# Altium footprint library LimeMicroAltiumLib.PcbLib: 876 footprints (part 28 of 57)
Each footprint in its own frame and in the unit in brackets; x right, y up, seen from the top. Pads: shape width x height; smd on the part's side, far side on the other; paste and mask are expansions set on the pad; w line width, h text height; cw(c..) or ccw(c..) is an arc to the next point about the centre after c.
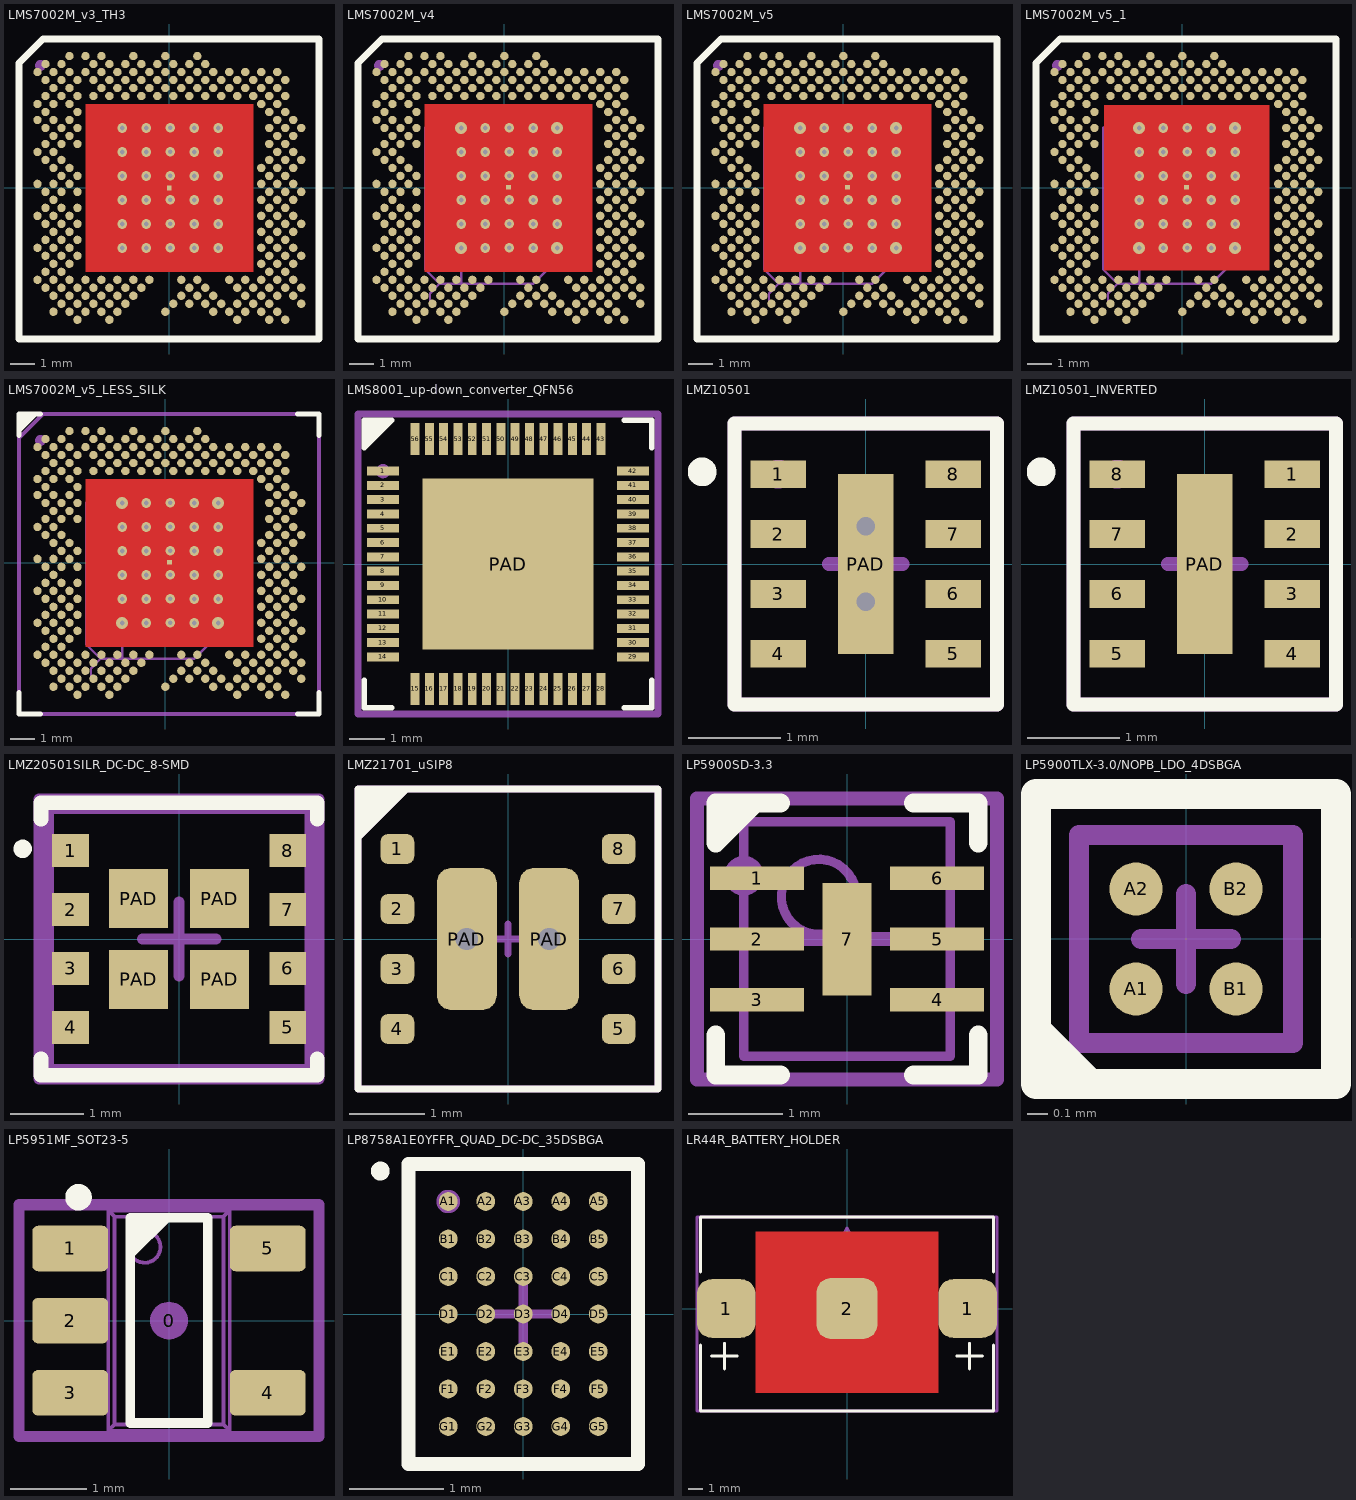
[diagram p27: the footprints below, top view; thin cyan lines are the x and y axes]

## LMS7002M_v3_TH3 [mm] "LMS7002 without AM2 pad (internally unconnected). Thermal pad version 3"
pads (261):
  round 0.35 smd mask+0: A5(-4.163,5.495) A7(-3.497,5.495) A9(-2.831,5.495) A13(-1.499,5.495) A17(-0.166,5.495) A21(1.166,5.495) AA1(-5.495,-1.166) AA3(-4.829,-1.166) AA5(-4.163,-1.166) AA29(3.83,-1.166) AA31(4.496,-1.165) AA33(5.162,-1.165) AB2(-5.162,-1.499) AB4(-4.496,-1.499) AB6(-3.83,-1.499) AB30(4.163,-1.499) AB32(4.829,-1.499) AB34(5.495,-1.499) AC3(-4.829,-1.832) AC5(-4.163,-1.832) AC29(3.83,-1.832) AC31(4.496,-1.832) AC33(5.162,-1.832) AD2(-5.162,-2.165) AD4(-4.496,-2.165) AD6(-3.83,-2.165) AD30(4.163,-2.165) AD32(4.829,-2.165) AE1(-5.495,-2.498) AE3(-4.829,-2.498) AE5(-4.163,-2.498) AE29(3.83,-2.498) AE31(4.496,-2.498) AE33(5.162,-2.498) AF2(-5.162,-2.831) AF4(-4.496,-2.831) AF6(-3.83,-2.831) AF30(4.163,-2.831) AF32(4.829,-2.831) AF34(5.495,-2.831) AG3(-4.829,-3.164) AG5(-4.163,-3.164) AG29(3.83,-3.164) AG31(4.496,-3.164) AG33(5.162,-3.164) AH2(-5.162,-3.497) AH4(-4.496,-3.497) AH30(4.163,-3.497) AH32(4.829,-3.497) AJ1(-5.495,-3.83) AJ3(-4.829,-3.83) AJ5(-4.163,-3.83) AJ7(-3.497,-3.83) AJ9(-2.831,-3.83) AJ11(-2.165,-3.83) AJ13(-1.499,-3.83) AJ15(-0.833,-3.83) AJ19(0.499,-3.83) AJ21(1.166,-3.83) AJ25(2.498,-3.83) AJ27(3.164,-3.83) AJ29(3.83,-3.83) AJ31(4.496,-3.83) AJ33(5.162,-3.83) AK2(-5.162,-4.163) AK4(-4.496,-4.163) AK6(-3.83,-4.163) AK8(-3.164,-4.163) AK10(-2.498,-4.163) AK12(-1.832,-4.163) AK14(-1.166,-4.163) AK20(0.833,-4.163) AK22(1.499,-4.163) AK26(2.831,-4.163) AK28(3.497,-4.163) AK30(4.163,-4.163) AK32(4.829,-4.163) AK34(5.495,-4.163) AL3(-4.829,-4.496) AL5(-4.163,-4.496) AL7(-3.497,-4.496) AL9(-2.831,-4.496) AL11(-2.165,-4.496) AL13(-1.499,-4.496) AL19(0.499,-4.496) AL21(1.166,-4.496) AL23(1.832,-4.496) AL27(3.164,-4.496) AL29(3.83,-4.496) AL31(4.496,-4.496) AL33(5.162,-4.496) AM4(-4.496,-4.829) AM6(-3.83,-4.829) AM8(-3.164,-4.829) AM10(-2.498,-4.829) AM12(-1.832,-4.829) AM18(0.166,-4.829) AM20(0.833,-4.829) AM22(1.499,-4.829) AM24(2.165,-4.829) AM26(2.831,-4.829) AM28(3.497,-4.829) AM30(4.163,-4.829) AM34(5.495,-4.829) AN3(-4.829,-5.162) AN5(-4.163,-5.162) AN7(-3.497,-5.162) AN9(-2.831,-5.162) AN11(-2.165,-5.162) AN17(-0.167,-5.162) AN23(1.832,-5.162) AN25(2.498,-5.162) AN27(3.164,-5.162) AN29(3.83,-5.162) AN31(4.496,-5.162) AP6(-3.83,-5.495) AP10(-2.498,-5.495) AP26(2.831,-5.495) AP30(4.163,-5.495) AP32(4.829,-5.495) B2(-5.162,5.162) B4(-4.496,5.162) B8(-3.164,5.162) B10(-2.498,5.162) B12(-1.832,5.162) B14(-1.166,5.162) B16(-0.5,5.162) B18(0.167,5.162) B20(0.833,5.162) B22(1.499,5.162) C1(-5.495,4.829) C3(-4.829,4.829) C5(-4.163,4.829) C7(-3.497,4.829) C9(-2.831,4.829) C11(-2.165,4.829) C13(-1.499,4.829) C15(-0.833,4.829) C17(-0.166,4.829) C19(0.5,4.829) C21(1.166,4.829) C23(1.832,4.829) C25(2.498,4.829) C27(3.164,4.829) C29(3.83,4.829) C31(4.496,4.829) D2(-5.162,4.496) D4(-4.496,4.496) D6(-3.83,4.496) D8(-3.164,4.496) D10(-2.498,4.496) D12(-1.832,4.496) D14(-1.166,4.496) D16(-0.5,4.496) D18(0.167,4.496) D20(0.833,4.496) D22(1.499,4.496) D24(2.165,4.496) D26(2.831,4.496) D28(3.497,4.496) D30(4.163,4.496) D32(4.829,4.496) E3(-4.829,4.163) E5(-4.163,4.163) E9(-2.831,4.163) E11(-2.165,4.163) E13(-1.499,4.163) E15(-0.833,4.163) E17(-0.166,4.163) E19(0.5,4.163) E21(1.166,4.163) E23(1.832,4.163) E25(2.498,4.163) E27(3.164,4.163) E29(3.83,4.163) E31(4.496,4.163) F2(-5.162,3.83) F4(-4.496,3.83) F6(-3.83,3.83) F8(-3.164,3.83) F10(-2.498,3.83) F12(-1.832,3.83) F14(-1.166,3.83) F16(-0.5,3.83) F18(0.167,3.83) F20(0.833,3.83) F22(1.499,3.83) F24(2.165,3.83) F26(2.831,3.83) F28(3.497,3.83) F30(4.163,3.83) F32(4.829,3.83) G1(-5.495,3.497) G3(-4.829,3.497) G5(-4.163,3.497) G29(3.83,3.497) G31(4.496,3.497) H2(-5.162,3.164) H6(-3.83,3.164) H30(4.163,3.164) H32(4.829,3.164) J1(-5.495,2.831) J3(-4.829,2.831) J5(-4.163,2.831) J31(4.496,2.831) J33(5.162,2.831) K2(-5.162,2.498) K4(-4.496,2.498) K6(-3.83,2.498) K30(4.163,2.498) K32(4.829,2.498) K34(5.495,2.498) L3(-4.829,2.165) L5(-4.163,2.165) L31(4.496,2.165) L33(5.162,2.165) M2(-5.162,1.832) M4(-4.496,1.832) M6(-3.83,1.832) M30(4.163,1.832) M32(4.829,1.832) N1(-5.495,1.498) N3(-4.829,1.498) N31(4.496,1.499) N33(5.162,1.499) P2(-5.162,1.165) P4(-4.496,1.165) P30(4.163,1.166) P32(4.829,1.166) P34(5.495,1.166) R3(-4.829,0.832) R5(-4.163,0.832) R29(3.83,0.833) R31(4.496,0.833) R33(5.162,0.833) T4(-4.496,0.499) T6(-3.83,0.499) T30(4.163,0.5) T32(4.829,0.5) U1(-5.495,0.166) U3(-4.829,0.166) U5(-4.163,0.166) U29(3.83,0.167) U31(4.496,0.167) U33(5.162,0.167) V2(-5.162,-0.167) V4(-4.496,-0.167) V6(-3.83,-0.167) V30(4.163,-0.166) V32(4.829,-0.166) V34(5.495,-0.166) W3(-4.829,-0.5) W29(3.83,-0.499) W31(4.496,-0.499) W33(5.162,-0.499) Y2(-5.162,-0.833) Y4(-4.496,-0.833) Y6(-3.83,-0.833) Y30(4.163,-0.833) Y32(4.829,-0.832)
  rect 0.2x0.2 smd: GND(0,0)
via 0.035,-1.496 diameter 0.4 hole 0.2
via 0.035,-2.496 diameter 0.4 hole 0.2
via 0.035,0.504 diameter 0.4 hole 0.2
via 0.035,-0.496 diameter 0.4 hole 0.2
via 0.035,1.504 diameter 0.4 hole 0.2
via 0.035,2.504 diameter 0.4 hole 0.2
via -0.965,2.494 diameter 0.4 hole 0.2
via -0.965,1.494 diameter 0.4 hole 0.2
via -0.965,-0.506 diameter 0.4 hole 0.2
via -0.965,0.494 diameter 0.4 hole 0.2
via -0.965,-2.506 diameter 0.4 hole 0.2
via -0.965,-1.506 diameter 0.4 hole 0.2
via -1.965,2.494 diameter 0.4 hole 0.2
via -1.965,1.494 diameter 0.4 hole 0.2
via -1.965,-0.506 diameter 0.4 hole 0.2
via -1.965,0.494 diameter 0.4 hole 0.2
via -1.965,-2.506 diameter 0.4 hole 0.2
via -1.965,-1.506 diameter 0.4 hole 0.2
via 2.035,-1.506 diameter 0.4 hole 0.2
via 2.035,-2.506 diameter 0.4 hole 0.2
via 2.035,0.494 diameter 0.4 hole 0.2
via 2.035,-0.506 diameter 0.4 hole 0.2
via 2.035,1.494 diameter 0.4 hole 0.2
via 2.035,2.494 diameter 0.4 hole 0.2
via 1.035,-1.506 diameter 0.4 hole 0.2
via 1.035,-2.506 diameter 0.4 hole 0.2
via 1.035,0.494 diameter 0.4 hole 0.2
via 1.035,-0.506 diameter 0.4 hole 0.2
via 1.035,1.494 diameter 0.4 hole 0.2
via 1.035,2.494 diameter 0.4 hole 0.2
Top Layer:
  rectangle: -3.49,-3.496 3.51,3.504
Top Overlay:
  lines w0.3: -6.265,-6.296 -6.265,5.204 -5.265,6.204 6.235,6.204 6.235,-6.296 -6.265,-6.296
Top Paste:
  region: -1.192,-2.783 0.045,-1.545 -1.545,0.045 -2.783,-1.192 -2.853,-1.262 -2.929,-1.446 -2.929,-1.645 -2.853,-1.829 -2.783,-1.899 -1.899,-2.783 -1.829,-2.853 -1.645,-2.929 -1.446,-2.929 -1.262,-2.853
  region: 0.045,1.636 -1.545,0.045 0.045,-1.545 1.636,0.045
  region: 1.283,2.874 0.045,1.636 1.636,0.045 2.874,1.283 2.944,1.353 3.02,1.537 3.02,1.736 2.944,1.92 2.874,1.99 1.99,2.874 1.92,2.944 1.736,3.02 1.537,3.02 1.353,2.944
  region: -2.783,1.283 -2,0.5 -1.92,0.403 -1.824,0.171 -1.824,-0.08 -1.92,-0.312 -2,-0.409 -2.783,-1.192 -1.192,-2.783 2.874,1.283 1.283,2.874 0.399,1.99 0.323,1.928 0.143,1.853 -0.052,1.853 -0.232,1.928 -0.308,1.99 -1.192,2.874 -1.262,2.944 -1.446,3.02 -1.645,3.02 -1.829,2.944 -1.899,2.874 -2.783,1.99 -2.853,1.92 -2.929,1.736 -2.929,1.537 -2.853,1.353
  region: 2.874,-1.192 2.091,-0.409 2.011,-0.312 1.915,-0.08 1.915,0.171 2.011,0.403 2.091,0.5 2.874,1.283 1.283,2.874 -2.783,-1.192 -1.192,-2.783 -0.308,-1.899 -0.232,-1.837 -0.052,-1.762 0.143,-1.762 0.323,-1.837 0.399,-1.899 1.283,-2.783 1.353,-2.853 1.537,-2.929 1.736,-2.929 1.92,-2.853 1.99,-2.783 2.874,-1.899 2.944,-1.829 3.02,-1.645 3.02,-1.446 2.944,-1.262
Top Solder:
  rectangle: -3.49,-3.496 3.51,3.504
Mechanical 15:
  circle w0.35: c-5.365,5.104 r0.05
  lines w0.15: -6.265,-6.296 -6.265,5.204 -5.265,6.204 6.235,6.204 6.235,-6.296 -6.265,-6.296
  text ".Designator" at -0.165,0.004 h0.55
3D body "LMS7002M_11p5x11p5.STEP": height 0.97, standoff 0.03, extent -5.764,-5.746 5.736,5.754

## LMS7002M_v4 [mm] "LMS7002 without AM2 pad (internally unconnected)"
pads (261):
  round 0.35 smd mask+0: A5(-3.998,5.49) A7(-3.332,5.49) A9(-2.666,5.49) A13(-1.334,5.49) A17(-0.002,5.49) A21(1.33,5.49) AA1(-5.33,-1.17) AA3(-4.664,-1.17) AA5(-3.998,-1.17) AA29(3.994,-1.17) AA31(4.66,-1.17) AA33(5.326,-1.17) AB2(-4.997,-1.503) AB4(-4.331,-1.503) AB6(-3.665,-1.503) AB30(4.327,-1.503) AB32(4.993,-1.503) AB34(5.659,-1.503) AC3(-4.664,-1.836) AC5(-3.998,-1.836) AC29(3.994,-1.836) AC31(4.66,-1.836) AC33(5.326,-1.836) AD2(-4.997,-2.169) AD4(-4.331,-2.169) AD6(-3.665,-2.169) AD30(4.327,-2.169) AD32(4.993,-2.169) AE1(-5.33,-2.502) AE3(-4.664,-2.502) AE5(-3.998,-2.502) AE29(3.994,-2.502) AE31(4.66,-2.502) AE33(5.326,-2.502) AF2(-4.997,-2.835) AF4(-4.331,-2.835) AF6(-3.665,-2.835) AF30(4.327,-2.835) AF32(4.993,-2.835) AF34(5.659,-2.835) AG3(-4.664,-3.168) AG5(-3.998,-3.168) AG29(3.994,-3.168) AG31(4.66,-3.168) AG33(5.326,-3.168) AH2(-4.997,-3.501) AH4(-4.331,-3.501) AH30(4.327,-3.501) AH32(4.993,-3.501) AJ1(-5.33,-3.834) AJ3(-4.664,-3.834) AJ5(-3.998,-3.834) AJ7(-3.332,-3.834) AJ9(-2.666,-3.834) AJ11(-2,-3.834) AJ13(-1.334,-3.834) AJ15(-0.668,-3.834) AJ19(0.664,-3.834) AJ21(1.33,-3.834) AJ25(2.662,-3.834) AJ27(3.328,-3.834) AJ29(3.994,-3.834) AJ31(4.66,-3.834) AJ33(5.326,-3.834) AK2(-4.997,-4.167) AK4(-4.331,-4.167) AK6(-3.665,-4.167) AK8(-2.999,-4.167) AK10(-2.333,-4.167) AK12(-1.667,-4.167) AK14(-1.001,-4.167) AK20(0.997,-4.167) AK22(1.663,-4.167) AK26(2.995,-4.167) AK28(3.661,-4.167) AK30(4.327,-4.167) AK32(4.993,-4.167) AK34(5.659,-4.167) AL3(-4.664,-4.5) AL5(-3.998,-4.5) AL7(-3.332,-4.5) AL9(-2.666,-4.5) AL11(-2,-4.5) AL13(-1.334,-4.5) AL19(0.664,-4.5) AL21(1.33,-4.5) AL23(1.996,-4.5) AL27(3.328,-4.5) AL29(3.994,-4.5) AL31(4.66,-4.5) AL33(5.326,-4.5) AM4(-4.331,-4.833) AM6(-3.665,-4.833) AM8(-2.999,-4.833) AM10(-2.333,-4.833) AM12(-1.667,-4.833) AM18(0.331,-4.833) AM20(0.997,-4.833) AM22(1.663,-4.833) AM24(2.329,-4.833) AM26(2.995,-4.833) AM28(3.661,-4.833) AM30(4.327,-4.833) AM34(5.659,-4.833) AN3(-4.664,-5.166) AN5(-3.998,-5.166) AN7(-3.332,-5.166) AN9(-2.666,-5.166) AN11(-2,-5.166) AN17(-0.002,-5.166) AN23(1.996,-5.166) AN25(2.662,-5.166) AN27(3.328,-5.166) AN29(3.994,-5.166) AN31(4.66,-5.166) AP6(-3.665,-5.499) AP10(-2.333,-5.499) AP26(2.995,-5.499) AP30(4.327,-5.499) AP32(4.993,-5.499) B2(-4.997,5.157) B4(-4.331,5.157) B8(-2.999,5.157) B10(-2.333,5.157) B12(-1.667,5.157) B14(-1.001,5.157) B16(-0.335,5.157) B18(0.331,5.157) B20(0.997,5.157) B22(1.663,5.157) C1(-5.33,4.824) C3(-4.664,4.824) C5(-3.998,4.824) C7(-3.332,4.824) C9(-2.666,4.824) C11(-2,4.824) C13(-1.334,4.824) C15(-0.668,4.824) C17(-0.002,4.824) C19(0.664,4.824) C21(1.33,4.824) C23(1.996,4.824) C25(2.662,4.824) C27(3.328,4.824) C29(3.994,4.824) C31(4.66,4.824) D2(-4.997,4.491) D4(-4.331,4.491) D6(-3.665,4.491) D8(-2.999,4.491) D10(-2.333,4.491) D12(-1.667,4.491) D14(-1.001,4.491) D16(-0.335,4.491) D18(0.331,4.491) D20(0.997,4.491) D22(1.663,4.491) D24(2.329,4.491) D26(2.995,4.491) D28(3.661,4.491) D30(4.327,4.491) D32(4.993,4.491) E3(-4.664,4.158) E5(-3.998,4.158) E9(-2.666,4.158) E11(-2,4.158) E13(-1.334,4.158) E15(-0.668,4.158) E17(-0.002,4.158) E19(0.664,4.158) E21(1.33,4.158) E23(1.996,4.158) E25(2.662,4.158) E27(3.328,4.158) E29(3.994,4.158) E31(4.66,4.158) F2(-4.997,3.825) F4(-4.331,3.825) F6(-3.665,3.825) F8(-2.999,3.825) F10(-2.333,3.825) F12(-1.667,3.825) F14(-1.001,3.825) F16(-0.335,3.825) F18(0.331,3.825) F20(0.997,3.825) F22(1.663,3.825) F24(2.329,3.825) F26(2.995,3.825) F28(3.661,3.825) F30(4.327,3.825) F32(4.993,3.825) G1(-5.33,3.492) G3(-4.664,3.492) G5(-3.998,3.492) G29(3.994,3.492) G31(4.66,3.492) H2(-4.997,3.159) H6(-3.665,3.159) H30(4.327,3.159) H32(4.993,3.159) J1(-5.33,2.826) J3(-4.664,2.826) J5(-3.998,2.826) J31(4.66,2.826) J33(5.326,2.826) K2(-4.997,2.493) K4(-4.331,2.493) K6(-3.665,2.493) K30(4.327,2.493) K32(4.993,2.493) K34(5.659,2.493) L3(-4.664,2.16) L5(-3.998,2.16) L31(4.66,2.16) L33(5.326,2.16) M2(-4.997,1.827) M4(-4.331,1.827) M6(-3.665,1.827) M30(4.327,1.827) M32(4.993,1.827) N1(-5.33,1.494) N3(-4.664,1.494) N31(4.66,1.494) N33(5.326,1.494) P2(-4.997,1.161) P4(-4.331,1.161) P30(4.327,1.161) P32(4.993,1.161) P34(5.659,1.161) R3(-4.664,0.828) R5(-3.998,0.828) R29(3.994,0.828) R31(4.66,0.828) R33(5.326,0.828) T4(-4.331,0.495) T6(-3.665,0.495) T30(4.327,0.495) T32(4.993,0.495) U1(-5.33,0.162) U3(-4.664,0.162) U5(-3.998,0.162) U29(3.994,0.162) U31(4.66,0.162) U33(5.326,0.162) V2(-4.997,-0.171) V4(-4.331,-0.171) V6(-3.665,-0.171) V30(4.327,-0.171) V32(4.993,-0.171) V34(5.659,-0.171) W3(-4.664,-0.504) W29(3.994,-0.504) W31(4.66,-0.504) W33(5.326,-0.504) Y2(-4.997,-0.837) Y4(-4.331,-0.837) Y6(-3.665,-0.837) Y30(4.327,-0.837) Y32(4.993,-0.837)
  rect 0.2x0.2 smd: GND(0.175,0.025)
via 1.2,2.49 diameter 0.4 hole 0.2
via 1.2,1.49 diameter 0.4 hole 0.2
via 1.2,-0.51 diameter 0.4 hole 0.2
via 1.2,0.49 diameter 0.4 hole 0.2
via 1.2,-2.51 diameter 0.4 hole 0.2
via 1.2,-1.51 diameter 0.4 hole 0.2
via 2.2,2.49 diameter 0.5 hole 0.2
via 2.2,1.49 diameter 0.4 hole 0.2
via 2.2,-0.51 diameter 0.4 hole 0.2
via 2.2,0.49 diameter 0.4 hole 0.2
via 2.2,-2.51 diameter 0.5 hole 0.2
via 2.2,-1.51 diameter 0.4 hole 0.2
via -1.8,-1.51 diameter 0.4 hole 0.2
via -1.8,-2.51 diameter 0.5 hole 0.2
via -1.8,0.49 diameter 0.4 hole 0.2
via -1.8,-0.51 diameter 0.4 hole 0.2
via -1.8,1.49 diameter 0.4 hole 0.2
via -1.8,2.49 diameter 0.5 hole 0.2
via -0.8,-1.51 diameter 0.4 hole 0.2
via -0.8,-2.51 diameter 0.4 hole 0.2
via -0.8,0.49 diameter 0.4 hole 0.2
via -0.8,-0.51 diameter 0.4 hole 0.2
via -0.8,1.49 diameter 0.4 hole 0.2
via -0.8,2.49 diameter 0.4 hole 0.2
via 0.2,2.5 diameter 0.4 hole 0.2
via 0.2,1.5 diameter 0.4 hole 0.2
via 0.2,-0.5 diameter 0.4 hole 0.2
via 0.2,0.5 diameter 0.4 hole 0.2
via 0.2,-2.5 diameter 0.4 hole 0.2
via 0.2,-1.5 diameter 0.4 hole 0.2
Top Layer:
  rectangle: -3.325,-3.5 3.675,3.5
Top Overlay:
  lines w0.3: -6.1,-6.3 6.4,-6.3 6.4,6.2 -5.1,6.2 -6.1,5.2 -6.1,-6.3
Top Paste:
  drawing of 42 lines, arcs and shapes, not listed
Top Solder:
  rectangle: -3.325,-3.5 3.675,3.5
Mechanical 1:
  lines w0.1: -3.1,-4.7 -3.1,-4.4 -2.7,-4 ; -2.083,2.49 -1.8,2.49 ; -2,-2.71 -1.8,-2.51 ; -1.8,2.207 -1.8,2.49 ; -1.6,-2.71 -1.8,-2.51 ; 1.917,2.49 2.2,2.49 ; 2,-2.71 2.2,-2.51 ; 2.2,2.773 2.2,2.49 ; 2.4,-2.71 2.2,-2.51 ; -3.3,0.99 -3.3,2.5 -2.7,3.1 1.59,3.1 2.2,2.49 ; -3.3,0.99 -1.8,2.49 ; -3.3,0.99 -3.3,-3.4 -2.7,-4 ; -2.7,-4 -1.8,-4 ; -1.8,-4 1.2,-4 1.5,-3.7 2.2,-3 2.2,-2.51 ; -1.8,-4 -1.8,-2.51
  text "0.2mm/0.5mm hole/ring vias under   / pad to be left open (no metal cap)" at -6.6,-6.8 h0.35
Mechanical 15:
  circle w0.35: c-5.2,5.1 r0.05
  lines w0.15: -0.775,0 0,0 ; 0,-0.775 0,0 ; 0,0.775 0,0 ; 0.775,0 0,0 ; -6.1,-6.3 6.4,-6.3 6.4,6.2 -5.1,6.2 -6.1,5.2 -6.1,-6.3
  text ".Designator" at 0,0 h0.55
  text "1) paste/pad ratio ~65% / 2) 4 thermal pad vias  / without metal cap / 3) all other thermal pad  / vias with metal cap" at -4.125,1.525 h0.4
  text "Pad size = 0.35mm / Pad paste mask = 0.35mm / No AM2 pad" at -5.6,-4.25 h0.4
  text "Footprint revision: r4" at -2.45,-6.075 h0.4
3D body "LMS7002M_11p5x11p5.STEP": height 0.97, standoff 0.03, extent -5.6,-5.75 5.9,5.75

## LMS7002M_v5 [mm] "LMS7002 without AM2 pad (internally unconnected)"
pads (261):
  round 0.35 smd mask+0: A5(-3.998,5.49) A7(-3.332,5.49) A9(-2.666,5.49) A13(-1.334,5.49) A17(-0.002,5.49) A21(1.33,5.49) AA1(-5.33,-1.17) AA3(-4.664,-1.17) AA5(-3.998,-1.17) AA29(3.994,-1.17) AA31(4.66,-1.17) AA33(5.326,-1.17) AB2(-4.997,-1.503) AB4(-4.331,-1.503) AB6(-3.665,-1.503) AB30(4.327,-1.503) AB32(4.993,-1.503) AB34(5.659,-1.503) AC3(-4.664,-1.836) AC5(-3.998,-1.836) AC29(3.994,-1.836) AC31(4.66,-1.836) AC33(5.326,-1.836) AD2(-4.997,-2.169) AD4(-4.331,-2.169) AD6(-3.665,-2.169) AD30(4.327,-2.169) AD32(4.993,-2.169) AE1(-5.33,-2.502) AE3(-4.664,-2.502) AE5(-3.998,-2.502) AE29(3.994,-2.502) AE31(4.66,-2.502) AE33(5.326,-2.502) AF2(-4.997,-2.835) AF4(-4.331,-2.835) AF6(-3.665,-2.835) AF30(4.327,-2.835) AF32(4.993,-2.835) AF34(5.659,-2.835) AG3(-4.664,-3.168) AG5(-3.998,-3.168) AG29(3.994,-3.168) AG31(4.66,-3.168) AG33(5.326,-3.168) AH2(-4.997,-3.501) AH4(-4.331,-3.501) AH30(4.327,-3.501) AH32(4.993,-3.501) AJ1(-5.33,-3.834) AJ3(-4.664,-3.834) AJ5(-3.998,-3.834) AJ7(-3.332,-3.834) AJ9(-2.666,-3.834) AJ11(-2,-3.834) AJ13(-1.334,-3.834) AJ15(-0.668,-3.834) AJ19(0.664,-3.834) AJ21(1.33,-3.834) AJ25(2.662,-3.834) AJ27(3.328,-3.834) AJ29(3.994,-3.834) AJ31(4.66,-3.834) AJ33(5.326,-3.834) AK2(-4.997,-4.167) AK4(-4.331,-4.167) AK6(-3.665,-4.167) AK8(-2.999,-4.167) AK10(-2.333,-4.167) AK12(-1.667,-4.167) AK14(-1.001,-4.167) AK20(0.997,-4.167) AK22(1.663,-4.167) AK26(2.995,-4.167) AK28(3.661,-4.167) AK30(4.327,-4.167) AK32(4.993,-4.167) AK34(5.659,-4.167) AL3(-4.664,-4.5) AL5(-3.998,-4.5) AL7(-3.332,-4.5) AL9(-2.666,-4.5) AL11(-2,-4.5) AL13(-1.334,-4.5) AL19(0.664,-4.5) AL21(1.33,-4.5) AL23(1.996,-4.5) AL27(3.328,-4.5) AL29(3.994,-4.5) AL31(4.66,-4.5) AL33(5.326,-4.5) AM4(-4.331,-4.833) AM6(-3.665,-4.833) AM8(-2.999,-4.833) AM10(-2.333,-4.833) AM12(-1.667,-4.833) AM18(0.331,-4.833) AM20(0.997,-4.833) AM22(1.663,-4.833) AM24(2.329,-4.833) AM26(2.995,-4.833) AM28(3.661,-4.833) AM30(4.327,-4.833) AM34(5.659,-4.833) AN3(-4.664,-5.166) AN5(-3.998,-5.166) AN7(-3.332,-5.166) AN9(-2.666,-5.166) AN11(-2,-5.166) AN17(-0.002,-5.166) AN23(1.996,-5.166) AN25(2.662,-5.166) AN27(3.328,-5.166) AN29(3.994,-5.166) AN31(4.66,-5.166) AP6(-3.665,-5.499) AP10(-2.333,-5.499) AP26(2.995,-5.499) AP30(4.327,-5.499) AP32(4.993,-5.499) B2(-4.997,5.157) B4(-4.331,5.157) B8(-2.999,5.157) B10(-2.333,5.157) B12(-1.667,5.157) B14(-1.001,5.157) B16(-0.335,5.157) B18(0.331,5.157) B20(0.997,5.157) B22(1.663,5.157) C1(-5.33,4.824) C3(-4.664,4.824) C5(-3.998,4.824) C7(-3.332,4.824) C9(-2.666,4.824) C11(-2,4.824) C13(-1.334,4.824) C15(-0.668,4.824) C17(-0.002,4.824) C19(0.664,4.824) C21(1.33,4.824) C23(1.996,4.824) C25(2.662,4.824) C27(3.328,4.824) C29(3.994,4.824) C31(4.66,4.824) D2(-4.997,4.491) D4(-4.331,4.491) D6(-3.665,4.491) D8(-2.999,4.491) D10(-2.333,4.491) D12(-1.667,4.491) D14(-1.001,4.491) D16(-0.335,4.491) D18(0.331,4.491) D20(0.997,4.491) D22(1.663,4.491) D24(2.329,4.491) D26(2.995,4.491) D28(3.661,4.491) D30(4.327,4.491) D32(4.993,4.491) E3(-4.664,4.158) E5(-3.998,4.158) E9(-2.666,4.158) E11(-2,4.158) E13(-1.334,4.158) E15(-0.668,4.158) E17(-0.002,4.158) E19(0.664,4.158) E21(1.33,4.158) E23(1.996,4.158) E25(2.662,4.158) E27(3.328,4.158) E29(3.994,4.158) E31(4.66,4.158) F2(-4.997,3.825) F4(-4.331,3.825) F6(-3.665,3.825) F8(-2.999,3.825) F10(-2.333,3.825) F12(-1.667,3.825) F14(-1.001,3.825) F16(-0.335,3.825) F18(0.331,3.825) F20(0.997,3.825) F22(1.663,3.825) F24(2.329,3.825) F26(2.995,3.825) F28(3.661,3.825) F30(4.327,3.825) F32(4.993,3.825) G1(-5.33,3.492) G3(-4.664,3.492) G5(-3.998,3.492) G29(3.994,3.492) G31(4.66,3.492) H2(-4.997,3.159) H6(-3.665,3.159) H30(4.327,3.159) H32(4.993,3.159) J1(-5.33,2.826) J3(-4.664,2.826) J5(-3.998,2.826) J31(4.66,2.826) J33(5.326,2.826) K2(-4.997,2.493) K4(-4.331,2.493) K6(-3.665,2.493) K30(4.327,2.493) K32(4.993,2.493) K34(5.659,2.493) L3(-4.664,2.16) L5(-3.998,2.16) L31(4.66,2.16) L33(5.326,2.16) M2(-4.997,1.827) M4(-4.331,1.827) M6(-3.665,1.827) M30(4.327,1.827) M32(4.993,1.827) N1(-5.33,1.494) N3(-4.664,1.494) N31(4.66,1.494) N33(5.326,1.494) P2(-4.997,1.161) P4(-4.331,1.161) P30(4.327,1.161) P32(4.993,1.161) P34(5.659,1.161) R3(-4.664,0.828) R5(-3.998,0.828) R29(3.994,0.828) R31(4.66,0.828) R33(5.326,0.828) T4(-4.331,0.495) T6(-3.665,0.495) T30(4.327,0.495) T32(4.993,0.495) U1(-5.33,0.162) U3(-4.664,0.162) U5(-3.998,0.162) U29(3.994,0.162) U31(4.66,0.162) U33(5.326,0.162) V2(-4.997,-0.171) V4(-4.331,-0.171) V6(-3.665,-0.171) V30(4.327,-0.171) V32(4.993,-0.171) V34(5.659,-0.171) W3(-4.664,-0.504) W29(3.994,-0.504) W31(4.66,-0.504) W33(5.326,-0.504) Y2(-4.997,-0.837) Y4(-4.331,-0.837) Y6(-3.665,-0.837) Y30(4.327,-0.837) Y32(4.993,-0.837)
  rect 0.2x0.2 smd: GND(0.175,0.025)
via 0.2,-1.5 diameter 0.4 hole 0.2
via 0.2,-2.5 diameter 0.4 hole 0.2
via 0.2,0.5 diameter 0.4 hole 0.2
via 0.2,-0.5 diameter 0.4 hole 0.2
via 0.2,1.5 diameter 0.4 hole 0.2
via 0.2,2.5 diameter 0.4 hole 0.2
via -0.8,2.49 diameter 0.4 hole 0.2
via -0.8,1.49 diameter 0.4 hole 0.2
via -0.8,-0.51 diameter 0.4 hole 0.2
via -0.8,0.49 diameter 0.4 hole 0.2
via -0.8,-2.51 diameter 0.4 hole 0.2
via -0.8,-1.51 diameter 0.4 hole 0.2
via -1.8,2.49 diameter 0.5 hole 0.2
via -1.8,1.49 diameter 0.4 hole 0.2
via -1.8,-0.51 diameter 0.4 hole 0.2
via -1.8,0.49 diameter 0.4 hole 0.2
via -1.8,-2.51 diameter 0.5 hole 0.2
via -1.8,-1.51 diameter 0.4 hole 0.2
via 2.2,-1.51 diameter 0.4 hole 0.2
via 2.2,-2.51 diameter 0.5 hole 0.2
via 2.2,0.49 diameter 0.4 hole 0.2
via 2.2,-0.51 diameter 0.4 hole 0.2
via 2.2,1.49 diameter 0.4 hole 0.2
via 2.2,2.49 diameter 0.5 hole 0.2
via 1.2,-1.51 diameter 0.4 hole 0.2
via 1.2,-2.51 diameter 0.4 hole 0.2
via 1.2,0.49 diameter 0.4 hole 0.2
via 1.2,-0.51 diameter 0.4 hole 0.2
via 1.2,1.49 diameter 0.4 hole 0.2
via 1.2,2.49 diameter 0.4 hole 0.2
Top Layer:
  rectangle: -3.325,-3.5 3.675,3.5
Top Overlay:
  lines w0.3: -6.1,-6.3 -6.1,5.2 -5.1,6.2 6.4,6.2 6.4,-6.3 -6.1,-6.3
Top Paste:
  drawing of 45 lines, arcs and shapes, not listed
Top Solder:
  rectangle: -3.325,-3.5 3.675,3.5
Mechanical 1:
  lines w0.1: -3.1,-4.7 -3.1,-4.4 -2.7,-4 ; -2.083,2.49 -1.8,2.49 ; -2,-2.71 -1.8,-2.51 ; -1.8,2.207 -1.8,2.49 ; -1.6,-2.71 -1.8,-2.51 ; 1.917,2.49 2.2,2.49 ; 2,-2.71 2.2,-2.51 ; 2.2,2.773 2.2,2.49 ; 2.4,-2.71 2.2,-2.51 ; -3.3,0.99 -3.3,-3.4 -2.7,-4 ; -3.3,0.99 -1.8,2.49 ; -3.3,0.99 -3.3,2.5 -2.7,3.1 1.59,3.1 2.2,2.49 ; -2.7,-4 -1.8,-4 ; -1.8,-4 -1.8,-2.51 ; -1.8,-4 1.2,-4 1.5,-3.7 2.2,-3 2.2,-2.51
  text "0.2mm/0.5mm hole/ring vias under   / pad to be left open (no metal cap)" at -6.6,-6.8 h0.35
Mechanical 15:
  circle w0.35: c-5.2,5.1 r0.05
  lines w0.15: -0.775,0 0,0 ; 0,-0.775 0,0 ; 0,0.775 0,0 ; 0.775,0 0,0 ; -6.1,-6.3 -6.1,5.2 -5.1,6.2 6.4,6.2 6.4,-6.3 -6.1,-6.3
  text ".Designator" at 0,0 h0.55
  text "1) paste/pad ratio ~60% / 2) 4 thermal pad vias  / without metal cap / 3) all other thermal pad  / vias with metal cap" at -4.125,1.525 h0.4
  text "Pad size = 0.35mm / Pad paste mask = 0.35mm / No AM2 pad" at -5.6,-4.25 h0.4
  text "Footprint revision: r5" at -2.45,-6.075 h0.4
3D body "LMS7002M_11p5x11p5.STEP": height 0.97, standoff 0.03, extent -5.6,-5.75 5.9,5.75

## LMS7002M_v5_1 [mm] "LMS7002 without AM2 pad (internally unconnected). center pad soldermask reduced to fit 0.18mm tolerance"
pads (261):
  round 0.35 smd mask+0: A5(-3.998,5.49) A7(-3.332,5.49) A9(-2.666,5.49) A13(-1.334,5.49) A17(-0.002,5.49) A21(1.33,5.49) AA1(-5.33,-1.17) AA3(-4.664,-1.17) AA5(-3.998,-1.17) AA29(3.994,-1.17) AA31(4.66,-1.17) AA33(5.326,-1.17) AB2(-4.997,-1.503) AB4(-4.331,-1.503) AB6(-3.665,-1.503) AB30(4.327,-1.503) AB32(4.993,-1.503) AB34(5.659,-1.503) AC3(-4.664,-1.836) AC5(-3.998,-1.836) AC29(3.994,-1.836) AC31(4.66,-1.836) AC33(5.326,-1.836) AD2(-4.997,-2.169) AD4(-4.331,-2.169) AD6(-3.665,-2.169) AD30(4.327,-2.169) AD32(4.993,-2.169) AE1(-5.33,-2.502) AE3(-4.664,-2.502) AE5(-3.998,-2.502) AE29(3.994,-2.502) AE31(4.66,-2.502) AE33(5.326,-2.502) AF2(-4.997,-2.835) AF4(-4.331,-2.835) AF6(-3.665,-2.835) AF30(4.327,-2.835) AF32(4.993,-2.835) AF34(5.659,-2.835) AG3(-4.664,-3.168) AG5(-3.998,-3.168) AG29(3.994,-3.168) AG31(4.66,-3.168) AG33(5.326,-3.168) AH2(-4.997,-3.501) AH4(-4.331,-3.501) AH30(4.327,-3.501) AH32(4.993,-3.501) AJ1(-5.33,-3.834) AJ3(-4.664,-3.834) AJ5(-3.998,-3.834) AJ7(-3.332,-3.834) AJ9(-2.666,-3.834) AJ11(-2,-3.834) AJ13(-1.334,-3.834) AJ15(-0.668,-3.834) AJ19(0.664,-3.834) AJ21(1.33,-3.834) AJ25(2.662,-3.834) AJ27(3.328,-3.834) AJ29(3.994,-3.834) AJ31(4.66,-3.834) AJ33(5.326,-3.834) AK2(-4.997,-4.167) AK4(-4.331,-4.167) AK6(-3.665,-4.167) AK8(-2.999,-4.167) AK10(-2.333,-4.167) AK12(-1.667,-4.167) AK14(-1.001,-4.167) AK20(0.997,-4.167) AK22(1.663,-4.167) AK26(2.995,-4.167) AK28(3.661,-4.167) AK30(4.327,-4.167) AK32(4.993,-4.167) AK34(5.659,-4.167) AL3(-4.664,-4.5) AL5(-3.998,-4.5) AL7(-3.332,-4.5) AL9(-2.666,-4.5) AL11(-2,-4.5) AL13(-1.334,-4.5) AL19(0.664,-4.5) AL21(1.33,-4.5) AL23(1.996,-4.5) AL27(3.328,-4.5) AL29(3.994,-4.5) AL31(4.66,-4.5) AL33(5.326,-4.5) AM4(-4.331,-4.833) AM6(-3.665,-4.833) AM8(-2.999,-4.833) AM10(-2.333,-4.833) AM12(-1.667,-4.833) AM18(0.331,-4.833) AM20(0.997,-4.833) AM22(1.663,-4.833) AM24(2.329,-4.833) AM26(2.995,-4.833) AM28(3.661,-4.833) AM30(4.327,-4.833) AM34(5.659,-4.833) AN3(-4.664,-5.166) AN5(-3.998,-5.166) AN7(-3.332,-5.166) AN9(-2.666,-5.166) AN11(-2,-5.166) AN17(-0.002,-5.166) AN23(1.996,-5.166) AN25(2.662,-5.166) AN27(3.328,-5.166) AN29(3.994,-5.166) AN31(4.66,-5.166) AP6(-3.665,-5.499) AP10(-2.333,-5.499) AP26(2.995,-5.499) AP30(4.327,-5.499) AP32(4.993,-5.499) B2(-4.997,5.157) B4(-4.331,5.157) B8(-2.999,5.157) B10(-2.333,5.157) B12(-1.667,5.157) B14(-1.001,5.157) B16(-0.335,5.157) B18(0.331,5.157) B20(0.997,5.157) B22(1.663,5.157) C1(-5.33,4.824) C3(-4.664,4.824) C5(-3.998,4.824) C7(-3.332,4.824) C9(-2.666,4.824) C11(-2,4.824) C13(-1.334,4.824) C15(-0.668,4.824) C17(-0.002,4.824) C19(0.664,4.824) C21(1.33,4.824) C23(1.996,4.824) C25(2.662,4.824) C27(3.328,4.824) C29(3.994,4.824) C31(4.66,4.824) D2(-4.997,4.491) D4(-4.331,4.491) D6(-3.665,4.491) D8(-2.999,4.491) D10(-2.333,4.491) D12(-1.667,4.491) D14(-1.001,4.491) D16(-0.335,4.491) D18(0.331,4.491) D20(0.997,4.491) D22(1.663,4.491) D24(2.329,4.491) D26(2.995,4.491) D28(3.661,4.491) D30(4.327,4.491) D32(4.993,4.491) E3(-4.664,4.158) E5(-3.998,4.158) E9(-2.666,4.158) E11(-2,4.158) E13(-1.334,4.158) E15(-0.668,4.158) E17(-0.002,4.158) E19(0.664,4.158) E21(1.33,4.158) E23(1.996,4.158) E25(2.662,4.158) E27(3.328,4.158) E29(3.994,4.158) E31(4.66,4.158) F2(-4.997,3.825) F4(-4.331,3.825) F6(-3.665,3.825) F8(-2.999,3.825) F10(-2.333,3.825) F12(-1.667,3.825) F14(-1.001,3.825) F16(-0.335,3.825) F18(0.331,3.825) F20(0.997,3.825) F22(1.663,3.825) F24(2.329,3.825) F26(2.995,3.825) F28(3.661,3.825) F30(4.327,3.825) F32(4.993,3.825) G1(-5.33,3.492) G3(-4.664,3.492) G5(-3.998,3.492) G29(3.994,3.492) G31(4.66,3.492) H2(-4.997,3.159) H6(-3.665,3.159) H30(4.327,3.159) H32(4.993,3.159) J1(-5.33,2.826) J3(-4.664,2.826) J5(-3.998,2.826) J31(4.66,2.826) J33(5.326,2.826) K2(-4.997,2.493) K4(-4.331,2.493) K6(-3.665,2.493) K30(4.327,2.493) K32(4.993,2.493) K34(5.659,2.493) L3(-4.664,2.16) L5(-3.998,2.16) L31(4.66,2.16) L33(5.326,2.16) M2(-4.997,1.827) M4(-4.331,1.827) M6(-3.665,1.827) M30(4.327,1.827) M32(4.993,1.827) N1(-5.33,1.494) N3(-4.664,1.494) N31(4.66,1.494) N33(5.326,1.494) P2(-4.997,1.161) P4(-4.331,1.161) P30(4.327,1.161) P32(4.993,1.161) P34(5.659,1.161) R3(-4.664,0.828) R5(-3.998,0.828) R29(3.994,0.828) R31(4.66,0.828) R33(5.326,0.828) T4(-4.331,0.495) T6(-3.665,0.495) T30(4.327,0.495) T32(4.993,0.495) U1(-5.33,0.162) U3(-4.664,0.162) U5(-3.998,0.162) U29(3.994,0.162) U31(4.66,0.162) U33(5.326,0.162) V2(-4.997,-0.171) V4(-4.331,-0.171) V6(-3.665,-0.171) V30(4.327,-0.171) V32(4.993,-0.171) V34(5.659,-0.171) W3(-4.664,-0.504) W29(3.994,-0.504) W31(4.66,-0.504) W33(5.326,-0.504) Y2(-4.997,-0.837) Y4(-4.331,-0.837) Y6(-3.665,-0.837) Y30(4.327,-0.837) Y32(4.993,-0.837)
  rect 0.2x0.2 smd: GND(0.175,0.025)
via 0.2,-1.5 diameter 0.4 hole 0.2
via 0.2,-2.5 diameter 0.4 hole 0.2
via 0.2,0.5 diameter 0.4 hole 0.2
via 0.2,-0.5 diameter 0.4 hole 0.2
via 0.2,1.5 diameter 0.4 hole 0.2
via 0.2,2.5 diameter 0.4 hole 0.2
via -0.8,2.49 diameter 0.4 hole 0.2
via -0.8,1.49 diameter 0.4 hole 0.2
via -0.8,-0.51 diameter 0.4 hole 0.2
via -0.8,0.49 diameter 0.4 hole 0.2
via -0.8,-2.51 diameter 0.4 hole 0.2
via -0.8,-1.51 diameter 0.4 hole 0.2
via -1.8,2.49 diameter 0.5 hole 0.2
via -1.8,1.49 diameter 0.4 hole 0.2
via -1.8,-0.51 diameter 0.4 hole 0.2
via -1.8,0.49 diameter 0.4 hole 0.2
via -1.8,-2.51 diameter 0.5 hole 0.2
via -1.8,-1.51 diameter 0.4 hole 0.2
via 2.2,-1.51 diameter 0.4 hole 0.2
via 2.2,-2.51 diameter 0.5 hole 0.2
via 2.2,0.49 diameter 0.4 hole 0.2
via 2.2,-0.51 diameter 0.4 hole 0.2
via 2.2,1.49 diameter 0.4 hole 0.2
via 2.2,2.49 diameter 0.5 hole 0.2
via 1.2,-1.51 diameter 0.4 hole 0.2
via 1.2,-2.51 diameter 0.4 hole 0.2
via 1.2,0.49 diameter 0.4 hole 0.2
via 1.2,-0.51 diameter 0.4 hole 0.2
via 1.2,1.49 diameter 0.4 hole 0.2
via 1.2,2.49 diameter 0.4 hole 0.2
Top Layer:
  rectangle: -3.275,-3.45 3.625,3.45
Top Overlay:
  lines w0.3: -6.1,-6.3 -6.1,5.2 -5.1,6.2 6.4,6.2 6.4,-6.3 -6.1,-6.3
Top Paste:
  drawing of 45 lines, arcs and shapes, not listed
Top Solder:
  rectangle: -3.275,-3.45 3.625,3.45
Mechanical 1:
  lines w0.1: -3.1,-4.7 -3.1,-4.4 -2.7,-4 ; -2.083,2.49 -1.8,2.49 ; -2,-2.71 -1.8,-2.51 ; -1.8,2.207 -1.8,2.49 ; -1.6,-2.71 -1.8,-2.51 ; 1.917,2.49 2.2,2.49 ; 2,-2.71 2.2,-2.51 ; 2.2,2.773 2.2,2.49 ; 2.4,-2.71 2.2,-2.51 ; -3.3,0.99 -3.3,-3.4 -2.7,-4 ; -3.3,0.99 -1.8,2.49 ; -3.3,0.99 -3.3,2.5 -2.7,3.1 1.59,3.1 2.2,2.49 ; -2.7,-4 -1.8,-4 ; -1.8,-4 -1.8,-2.51 ; -1.8,-4 1.2,-4 1.5,-3.7 2.2,-3 2.2,-2.51
  text "0.2mm/0.5mm hole/ring vias under   / pad to be left open (no metal cap)" at -6.6,-6.8 h0.35
Mechanical 15:
  circle w0.35: c-5.2,5.1 r0.05
  lines w0.15: -0.775,0 0,0 ; 0,-0.775 0,0 ; 0,0.775 0,0 ; 0.775,0 0,0 ; -6.1,-6.3 -6.1,5.2 -5.1,6.2 6.4,6.2 6.4,-6.3 -6.1,-6.3
  text ".Designator" at 0,0 h0.55
  text "1) paste/pad ratio ~60% / 2) 4 thermal pad vias  / without metal cap / 3) all other thermal pad  / vias with metal cap / 4) thermal pad reduced to / meet minimum 0.18mm soldermask / silver" at -5.775,-1.35 h0.4
  text "Pad size = 0.35mm / Pad paste mask = 0.35mm / No AM2 pad" at -5.6,-4.25 h0.4
  text "Footprint revision: r5.1" at -2.975,-6.075 h0.4
3D body "LMS7002M_11p5x11p5.STEP": height 0.97, standoff 0.03, extent -5.6,-5.75 5.9,5.75

## LMS7002M_v5_LESS_SILK [mm] "LMS7002 without AM2 pad (internally unconnected)"
pads (261):
  round 0.35 smd mask+0: A5(-3.998,5.49) A7(-3.332,5.49) A9(-2.666,5.49) A13(-1.334,5.49) A17(-0.002,5.49) A21(1.33,5.49) AA1(-5.33,-1.17) AA3(-4.664,-1.17) AA5(-3.998,-1.17) AA29(3.994,-1.17) AA31(4.66,-1.17) AA33(5.326,-1.17) AB2(-4.997,-1.503) AB4(-4.331,-1.503) AB6(-3.665,-1.503) AB30(4.327,-1.503) AB32(4.993,-1.503) AB34(5.659,-1.503) AC3(-4.664,-1.836) AC5(-3.998,-1.836) AC29(3.994,-1.836) AC31(4.66,-1.836) AC33(5.326,-1.836) AD2(-4.997,-2.169) AD4(-4.331,-2.169) AD6(-3.665,-2.169) AD30(4.327,-2.169) AD32(4.993,-2.169) AE1(-5.33,-2.502) AE3(-4.664,-2.502) AE5(-3.998,-2.502) AE29(3.994,-2.502) AE31(4.66,-2.502) AE33(5.326,-2.502) AF2(-4.997,-2.835) AF4(-4.331,-2.835) AF6(-3.665,-2.835) AF30(4.327,-2.835) AF32(4.993,-2.835) AF34(5.659,-2.835) AG3(-4.664,-3.168) AG5(-3.998,-3.168) AG29(3.994,-3.168) AG31(4.66,-3.168) AG33(5.326,-3.168) AH2(-4.997,-3.501) AH4(-4.331,-3.501) AH30(4.327,-3.501) AH32(4.993,-3.501) AJ1(-5.33,-3.834) AJ3(-4.664,-3.834) AJ5(-3.998,-3.834) AJ7(-3.332,-3.834) AJ9(-2.666,-3.834) AJ11(-2,-3.834) AJ13(-1.334,-3.834) AJ15(-0.668,-3.834) AJ19(0.664,-3.834) AJ21(1.33,-3.834) AJ25(2.662,-3.834) AJ27(3.328,-3.834) AJ29(3.994,-3.834) AJ31(4.66,-3.834) AJ33(5.326,-3.834) AK2(-4.997,-4.167) AK4(-4.331,-4.167) AK6(-3.665,-4.167) AK8(-2.999,-4.167) AK10(-2.333,-4.167) AK12(-1.667,-4.167) AK14(-1.001,-4.167) AK20(0.997,-4.167) AK22(1.663,-4.167) AK26(2.995,-4.167) AK28(3.661,-4.167) AK30(4.327,-4.167) AK32(4.993,-4.167) AK34(5.659,-4.167) AL3(-4.664,-4.5) AL5(-3.998,-4.5) AL7(-3.332,-4.5) AL9(-2.666,-4.5) AL11(-2,-4.5) AL13(-1.334,-4.5) AL19(0.664,-4.5) AL21(1.33,-4.5) AL23(1.996,-4.5) AL27(3.328,-4.5) AL29(3.994,-4.5) AL31(4.66,-4.5) AL33(5.326,-4.5) AM4(-4.331,-4.833) AM6(-3.665,-4.833) AM8(-2.999,-4.833) AM10(-2.333,-4.833) AM12(-1.667,-4.833) AM18(0.331,-4.833) AM20(0.997,-4.833) AM22(1.663,-4.833) AM24(2.329,-4.833) AM26(2.995,-4.833) AM28(3.661,-4.833) AM30(4.327,-4.833) AM34(5.659,-4.833) AN3(-4.664,-5.166) AN5(-3.998,-5.166) AN7(-3.332,-5.166) AN9(-2.666,-5.166) AN11(-2,-5.166) AN17(-0.002,-5.166) AN23(1.996,-5.166) AN25(2.662,-5.166) AN27(3.328,-5.166) AN29(3.994,-5.166) AN31(4.66,-5.166) AP6(-3.665,-5.499) AP10(-2.333,-5.499) AP26(2.995,-5.499) AP30(4.327,-5.499) AP32(4.993,-5.499) B2(-4.997,5.157) B4(-4.331,5.157) B8(-2.999,5.157) B10(-2.333,5.157) B12(-1.667,5.157) B14(-1.001,5.157) B16(-0.335,5.157) B18(0.331,5.157) B20(0.997,5.157) B22(1.663,5.157) C1(-5.33,4.824) C3(-4.664,4.824) C5(-3.998,4.824) C7(-3.332,4.824) C9(-2.666,4.824) C11(-2,4.824) C13(-1.334,4.824) C15(-0.668,4.824) C17(-0.002,4.824) C19(0.664,4.824) C21(1.33,4.824) C23(1.996,4.824) C25(2.662,4.824) C27(3.328,4.824) C29(3.994,4.824) C31(4.66,4.824) D2(-4.997,4.491) D4(-4.331,4.491) D6(-3.665,4.491) D8(-2.999,4.491) D10(-2.333,4.491) D12(-1.667,4.491) D14(-1.001,4.491) D16(-0.335,4.491) D18(0.331,4.491) D20(0.997,4.491) D22(1.663,4.491) D24(2.329,4.491) D26(2.995,4.491) D28(3.661,4.491) D30(4.327,4.491) D32(4.993,4.491) E3(-4.664,4.158) E5(-3.998,4.158) E9(-2.666,4.158) E11(-2,4.158) E13(-1.334,4.158) E15(-0.668,4.158) E17(-0.002,4.158) E19(0.664,4.158) E21(1.33,4.158) E23(1.996,4.158) E25(2.662,4.158) E27(3.328,4.158) E29(3.994,4.158) E31(4.66,4.158) F2(-4.997,3.825) F4(-4.331,3.825) F6(-3.665,3.825) F8(-2.999,3.825) F10(-2.333,3.825) F12(-1.667,3.825) F14(-1.001,3.825) F16(-0.335,3.825) F18(0.331,3.825) F20(0.997,3.825) F22(1.663,3.825) F24(2.329,3.825) F26(2.995,3.825) F28(3.661,3.825) F30(4.327,3.825) F32(4.993,3.825) G1(-5.33,3.492) G3(-4.664,3.492) G5(-3.998,3.492) G29(3.994,3.492) G31(4.66,3.492) H2(-4.997,3.159) H6(-3.665,3.159) H30(4.327,3.159) H32(4.993,3.159) J1(-5.33,2.826) J3(-4.664,2.826) J5(-3.998,2.826) J31(4.66,2.826) J33(5.326,2.826) K2(-4.997,2.493) K4(-4.331,2.493) K6(-3.665,2.493) K30(4.327,2.493) K32(4.993,2.493) K34(5.659,2.493) L3(-4.664,2.16) L5(-3.998,2.16) L31(4.66,2.16) L33(5.326,2.16) M2(-4.997,1.827) M4(-4.331,1.827) M6(-3.665,1.827) M30(4.327,1.827) M32(4.993,1.827) N1(-5.33,1.494) N3(-4.664,1.494) N31(4.66,1.494) N33(5.326,1.494) P2(-4.997,1.161) P4(-4.331,1.161) P30(4.327,1.161) P32(4.993,1.161) P34(5.659,1.161) R3(-4.664,0.828) R5(-3.998,0.828) R29(3.994,0.828) R31(4.66,0.828) R33(5.326,0.828) T4(-4.331,0.495) T6(-3.665,0.495) T30(4.327,0.495) T32(4.993,0.495) U1(-5.33,0.162) U3(-4.664,0.162) U5(-3.998,0.162) U29(3.994,0.162) U31(4.66,0.162) U33(5.326,0.162) V2(-4.997,-0.171) V4(-4.331,-0.171) V6(-3.665,-0.171) V30(4.327,-0.171) V32(4.993,-0.171) V34(5.659,-0.171) W3(-4.664,-0.504) W29(3.994,-0.504) W31(4.66,-0.504) W33(5.326,-0.504) Y2(-4.997,-0.837) Y4(-4.331,-0.837) Y6(-3.665,-0.837) Y30(4.327,-0.837) Y32(4.993,-0.837)
  rect 0.2x0.2 smd: GND(0.175,0.025)
via 0.2,-1.5 diameter 0.4 hole 0.2
via 0.2,-2.5 diameter 0.4 hole 0.2
via 0.2,0.5 diameter 0.4 hole 0.2
via 0.2,-0.5 diameter 0.4 hole 0.2
via 0.2,1.5 diameter 0.4 hole 0.2
via 0.2,2.5 diameter 0.4 hole 0.2
via -0.8,2.49 diameter 0.4 hole 0.2
via -0.8,1.49 diameter 0.4 hole 0.2
via -0.8,-0.51 diameter 0.4 hole 0.2
via -0.8,0.49 diameter 0.4 hole 0.2
via -0.8,-2.51 diameter 0.4 hole 0.2
via -0.8,-1.51 diameter 0.4 hole 0.2
via -1.8,2.49 diameter 0.5 hole 0.2
via -1.8,1.49 diameter 0.4 hole 0.2
via -1.8,-0.51 diameter 0.4 hole 0.2
via -1.8,0.49 diameter 0.4 hole 0.2
via -1.8,-2.51 diameter 0.5 hole 0.2
via -1.8,-1.51 diameter 0.4 hole 0.2
via 2.2,-1.51 diameter 0.4 hole 0.2
via 2.2,-2.51 diameter 0.5 hole 0.2
via 2.2,0.49 diameter 0.4 hole 0.2
via 2.2,-0.51 diameter 0.4 hole 0.2
via 2.2,1.49 diameter 0.4 hole 0.2
via 2.2,2.49 diameter 0.5 hole 0.2
via 1.2,-1.51 diameter 0.4 hole 0.2
via 1.2,-2.51 diameter 0.4 hole 0.2
via 1.2,0.49 diameter 0.4 hole 0.2
via 1.2,-0.51 diameter 0.4 hole 0.2
via 1.2,1.49 diameter 0.4 hole 0.2
via 1.2,2.49 diameter 0.4 hole 0.2
Top Layer:
  rectangle: -3.325,-3.5 3.675,3.5
Top Overlay:
  region: -6.1,5.4 -6.1,6.2 -5.3,6.2
  lines w0.2: -6.1,-5.4 -6.1,-6.3 -5.2,-6.3 ; -6.1,5.3 -6.1,6.2 -5.2,6.2 ; 5.5,-6.3 6.4,-6.3 6.4,-5.4 ; 5.5,6.2 6.4,6.2 6.4,5.3
Top Paste:
  drawing of 45 lines, arcs and shapes, not listed
Top Solder:
  rectangle: -3.325,-3.5 3.675,3.5
Mechanical 1:
  lines w0.1: -3.1,-4.7 -3.1,-4.4 -2.7,-4 ; -2.083,2.49 -1.8,2.49 ; -2,-2.71 -1.8,-2.51 ; -1.8,2.207 -1.8,2.49 ; -1.6,-2.71 -1.8,-2.51 ; 1.917,2.49 2.2,2.49 ; 2,-2.71 2.2,-2.51 ; 2.2,2.773 2.2,2.49 ; 2.4,-2.71 2.2,-2.51 ; -3.3,0.99 -3.3,-3.4 -2.7,-4 ; -3.3,0.99 -1.8,2.49 ; -3.3,0.99 -3.3,2.5 -2.7,3.1 1.59,3.1 2.2,2.49 ; -2.7,-4 -1.8,-4 ; -1.8,-4 -1.8,-2.51 ; -1.8,-4 1.2,-4 1.5,-3.7 2.2,-3 2.2,-2.51
  text "0.2mm/0.5mm hole/ring vias under   / pad to be left open (no metal cap)" at -6.6,-6.8 h0.35
Mechanical 15:
  circle w0.35: c-5.2,5.1 r0.05
  lines w0.15: -0.775,0 0,0 ; 0,-0.775 0,0 ; 0,0.775 0,0 ; 0.775,0 0,0 ; -6.1,-6.3 -6.1,5.2 -5.1,6.2 6.4,6.2 6.4,-6.3 -6.1,-6.3
  text ".Designator" at 0,0 h0.55
  text "1) paste/pad ratio ~60% / 2) 4 thermal pad vias  / without metal cap / 3) all other thermal pad  / vias with metal cap" at -4.125,1.525 h0.4
  text "Pad size = 0.35mm / Pad paste mask = 0.35mm / No AM2 pad" at -5.6,-4.25 h0.4
  text "Footprint revision: r5" at -2.45,-6.075 h0.4
3D body "LMS7002M_11p5x11p5.STEP": height 0.97, standoff 0.03, extent -5.6,-5.75 5.9,5.75

## LMS8001_up-down_converter_QFN56 [mm]
pads (57):
  rect 0.908x0.25 smd paste+0 mask+0.02: 1(-3.5,2.6) 2(-3.5,2.2) 3(-3.5,1.8) 4(-3.5,1.4) 5(-3.5,1) 6(-3.5,0.6) 7(-3.5,0.2) 8(-3.5,-0.2) 9(-3.5,-0.6) 10(-3.5,-1) 11(-3.5,-1.4) 12(-3.5,-1.8) 13(-3.5,-2.2) 14(-3.5,-2.6) 29(3.5,-2.6) 30(3.5,-2.2) 31(3.5,-1.8) 32(3.5,-1.4) 33(3.5,-1) 34(3.5,-0.6) 35(3.5,-0.2) 36(3.5,0.2) 37(3.5,0.6) 38(3.5,1) 39(3.5,1.4) 40(3.5,1.8) 41(3.5,2.2) 42(3.5,2.6)
  rect 0.25x0.908 smd paste+0 mask+0.02: 15(-2.6,-3.5) 16(-2.2,-3.5) 17(-1.8,-3.5) 18(-1.4,-3.5) 19(-1,-3.5) 20(-0.6,-3.5) 21(-0.2,-3.5) 22(0.2,-3.5) 23(0.6,-3.5) 24(1,-3.5) 25(1.4,-3.5) 26(1.8,-3.5) 27(2.2,-3.5) 28(2.6,-3.5) 43(2.6,3.5) 44(2.2,3.5) 45(1.8,3.5) 46(1.4,3.5) 47(1,3.5) 48(0.6,3.5) 49(0.2,3.5) 50(-0.2,3.5) 51(-0.6,3.5) 52(-1,3.5) 53(-1.4,3.5) 54(-1.8,3.5) 55(-2.2,3.5) 56(-2.6,3.5)
  rect 4.8x4.8 smd paste+0 mask+0.02: PAD(0,0)
Top Overlay:
  region: -4.028,3.25 -3.25,4.027 -4.028,4.028
  lines w0.152: -4.028,-3.25 -4.028,-4.028 -3.25,-4.028 ; -4.028,3.61 -4.028,4.028 ; -3.61,4.028 -4.028,4.028 ; 3.25,-4.028 4.028,-4.028 4.028,-3.25 ; 3.25,4.028 4.028,4.028 4.028,3.25 ; -4.028,4.028 -3.25,4.028 -4.028,3.25 -4.028,4.028
Mechanical 15:
  circle w0.2: c-3.5,2.6 r0.1
  lines w0.2: -1,0 0,0 ; 0,-1 0,0 ; 0,1 0,0 ; 1,0 0,0 ; -4.2,-4.2 -4.2,4.2 4.2,4.2 4.2,-4.2 -4.2,-4.2
  text ".Designator" at 0,0 h0.55
3D body "User Library-QFN56_0_4.step": height 0.9, standoff 0, extent -3.505,-3.505 3.505,3.505

## LMZ10501 [mm] "LMZ10501"
pads (9):
  rect 0.6x0.3 smd mask+0.07: 1(-0.95,0.975) 2(-0.95,0.325) 3(-0.95,-0.325) 4(-0.95,-0.975) 5(0.95,-0.975) 6(0.95,-0.325) 7(0.95,0.325) 8(0.95,0.975)
  rect 0.6x1.95 smd mask+0.07: PAD(0,0)
via 0,0.41 diameter 0.4 hole 0.2
via 0,-0.41 diameter 0.4 hole 0.2
Top Overlay:
  circle w0.2: c-1.775,1 r0.056
  lines w0.15: -1.425,-1.525 -1.425,1.525 1.425,1.525 1.425,-1.525 -1.425,-1.525
Mechanical 15:
  circle w0.2: c-0.95,0.975 r0.056
  lines w0.15: -0.4,0 0,0 ; 0,-0.4 0,0 ; 0,0.4 0,0 ; 0.4,0 0,0 ; -1.425,-1.525 -1.425,1.525 1.425,1.525 1.425,-1.525 -1.425,-1.525
  text ".Designator" at 0,0 h0.55
3D body: height 0.41, standoff 0, extent -1.313,-1.525 1.312,1.525
3D body: height 1.5, standoff 0.5, extent -0.8,-1 0.8,1

## LMZ10501_INVERTED [mm] "LMZ10501"
pads (9):
  rect 0.6x0.3 smd mask+0.07: 1(0.95,0.975) 2(0.95,0.325) 3(0.95,-0.325) 4(0.95,-0.975) 5(-0.95,-0.975) 6(-0.95,-0.325) 7(-0.95,0.325) 8(-0.95,0.975)
  rect 0.6x1.95 smd mask+0.07: PAD(0,0)
Top Overlay:
  circle w0.2: c-1.775,1 r0.056
  lines w0.15: -1.425,-1.525 -1.425,1.525 1.425,1.525 1.425,-1.525 -1.425,-1.525
Mechanical 15:
  circle w0.2: c-0.95,0.975 r0.056
  lines w0.15: -0.4,0 0,0 ; 0,-0.4 0,0 ; 0,0.4 0,0 ; 0.4,0 0,0 ; -1.425,-1.525 -1.425,1.525 1.425,1.525 1.425,-1.525 -1.425,-1.525
  text "INVERTED" at -1.1,-1.3 h0.3
  text ".Designator" at 0,0 h0.55
3D body: height 0.41, standoff 0, extent -1.313,-1.525 1.312,1.525
3D body: height 1.5, standoff 0.5, extent -0.8,-1 0.8,1

## LMZ20501SILR_DC-DC_8-SMD [mm]
pads (12):
  rect 0.5x0.45 smd mask+0.05: 1(-1.475,1.2) 2(-1.475,0.4) 3(-1.475,-0.4) 4(-1.475,-1.2) 5(1.475,-1.2) 6(1.475,-0.4) 7(1.475,0.4) 8(1.475,1.2)
  rect 0.8x0.8 smd mask+0.05: PAD(-0.55,-0.55) PAD(-0.55,0.55) PAD(0.55,-0.55) PAD(0.55,0.55)
Top Overlay:
  circle w0.15: c-2.125,1.225 r0.05
  lines w0.2: -1.875,-1.625 -1.875,-1.85 1.875,-1.85 1.875,-1.625 ; -1.875,1.625 -1.875,1.85 1.875,1.85 1.875,1.625
Mechanical 13:
  lines w0.2: -1.8,-1.8 -1.8,1.8 1.8,1.8 1.8,-1.8 -1.8,-1.8
Mechanical 15:
  circle w0.2: c-1.475,1.225 r0.035
  lines w0.15: -0.5,0 0,0 ; 0,-0.5 0,0 ; 0,0.5 0,0 ; 0.5,0 0,0 ; -1.9,-1.9 -1.9,1.9 1.9,1.9 1.9,-1.9 -1.9,-1.9
  text ".Designator" at 0,0 h0.55
3D body "IC_Texas_Instruments_LMZ20502SILT_eec.STEP": height 0.25, standoff 0, extent -1.9,-1.9 1.9,1.9

## LMZ21701_uSIP8 [mm]
pads (10):
  rrect50% 0.45x0.4 smd mask+0.05: 1(-1.475,1.2) 2(-1.475,0.4) 3(-1.475,-0.4) 4(-1.475,-1.2) 5(1.475,-1.2) 6(1.475,-0.4) 7(1.475,0.4) 8(1.475,1.2)
  rrect50% 0.8x1.9 smd mask+0.05: PAD(-0.55,0) PAD(0.55,0)
via -0.55,0 diameter 0.6 hole 0.3
via 0.55,0 diameter 0.6 hole 0.3
Top Overlay:
  region: -2,1.3 -1.3,2 -2,2
  lines w0.1: -2,-2 -2,2 2,2 2,-2 -2,-2
Mechanical 15:
  region: -2,1.3 -1.3,2 -2,2
  lines w0.1: -0.2,0 0,0 ; 0,-0.2 0,0 ; 0,0.2 0,0 ; 0.2,0 0,0 ; -2,-2 2,-2 2,2 -2,2 -2,-2
  text "1" at -1.5,0.9 h0.55
  text ".Designator" at 0,0 h0.55
3D body "User Library-SIL0008E-1.step": height 1.75, standoff -0.05, extent -1.75,-1.75 1.75,1.75

## LP5900SD-3.3 [mm] "SON, 6-Leads, Body 2,50x2,20mm, Pitch 0,65mm, Thermal Pad 1,20x0,52mm, IPC Medium Density"
height 0.8
pads (7):
  rect 1x0.25 smd mask+0.05: 1(-0.96,0.65) 2(-0.96,0) 3(-0.96,-0.65) 4(0.96,-0.65) 5(0.96,0) 6(0.96,0.65)
  rect 0.52x1.2 smd mask+0.05: 7(0,0)
Top Overlay:
  region: -1.4,1.025 -1.4,1.45 -1,1.45 -0.987,1.438
  lines w0.2: -1.4,-1.025 -1.4,-1.45 -0.71,-1.45 ; -0.987,1.438 -1.4,1.025 -1.4,1.45 -0.71,1.45 ; 0.71,-1.45 1.4,-1.45 1.4,-1.025 ; 0.71,1.45 1.4,1.45 1.4,1.025
Mechanical 13:
  circle w0.1: c-0.3,0.45 r0.4
  lines w0.1: -1.1,-1.25 1.1,-1.25 1.1,1.25 -1.1,1.25 -1.1,-1.25
Mechanical 15:
  circle w0.35: c-1.1,0.675 r0.035
  lines w0.15: -0.5,0 0.5,0 ; 0,-0.5 0,0.5 ; -1.6,-1.5 1.6,-1.5 1.6,1.5 -1.6,1.5 -1.6,-1.5
  text ".Designator" at 0,0 h0.55
3D body: height 0.81, standoff 0, extent -0.899,0.7 -0.501,1.1
3D body: height 0.8, standoff 0, extent -1.1,-1.25 1.1,1.25

## LP5900TLX-3.0/NOPB_LDO_4DSBGA [mm]
pads (4):
  round 0.265 smd paste-0.132 mask+0.05: A1(-0.25,-0.25) A2(-0.25,0.25) B1(0.25,-0.25) B2(0.25,0.25)
Top Overlay:
  region: -0.375,-0.725 -0.75,-0.35 -0.75,-0.725
  lines w0.15: -0.75,-0.725 -0.75,0.725 0.75,0.725 0.75,-0.725 -0.75,-0.725
Mechanical 13:
  lines w0.1: -0.535,-0.52 0.535,-0.52 0.535,0.52 -0.535,0.52 -0.535,-0.52
Mechanical 15:
  circle w0.2: c-0.25,-0.25 r0.025
  lines w0.1: -0.225,0 0,0 ; 0,-0.225 0,0 ; 0,0.225 0,0 ; 0.225,0 0,0 ; -0.75,-0.725 0.75,-0.725 0.75,0.725 -0.75,0.725 -0.75,-0.725
  text ".Designator" at 0,0 h0.55
3D body: height 0.25, standoff 0, extent -0.535,-0.52 0.535,0.52
3D body: height 0.25, standoff 0, extent -0.425,-0.424 -0.225,-0.225

## LP5951MF_SOT23-5 [mm]
height 1.6
pads (6):
  round 0.5 on Mech15: 0(0,0)
  rrect25% 1x0.6 smd: 1(-1.3,0.95) 2(-1.3,0) 3(-1.3,-0.95) 4(1.3,-0.95) 5(1.3,0.95)
Top Overlay:
  circle w0.2: c-1.191,1.625 r0.075
  region: -0.508,1.353 0.053,1.353 -0.508,0.792
  lines w0.127: -0.508,-1.347 -0.508,1.353 0.508,1.353 0.508,-1.347 -0.508,-1.347
Mechanical 13:
  circle w0.05: c-0.32,0.97 r0.208
  lines w0.05: -1.191,-1.15 -1.191,-0.75 ; -1.191,-0.2 -1.191,0.2 ; -1.191,0.75 -1.191,1.15 ; -1.1,-1.15 -1.1,-0.75 ; -1.1,-0.2 -1.1,0.2 ; -1.1,0.75 -1.1,1.15 ; -1.094,-1.15 -1.094,-0.75 ; -1.094,-0.2 -1.094,0.2 ; -1.094,0.75 -1.094,1.15 ; -0.844,-1.15 -0.844,-0.75 ; -0.844,-0.2 -0.844,0.2 ; -0.844,0.75 -0.844,1.15 ; -0.8,-1.15 -1.4,-1.15 -1.4,-0.75 -0.8,-0.75 ; -0.8,-0.2 -1.4,-0.2 -1.4,0.2 -0.8,0.2 ; -0.8,0.75 -1.4,0.75 -1.4,1.15 -0.8,1.15 ; 0.8,-1.15 1.4,-1.15 1.4,-0.75 0.8,-0.75 ; 0.8,0.75 1.4,0.75 1.4,1.15 0.8,1.15 ; 0.844,-1.15 0.844,-0.75 ; 0.844,0.75 0.844,1.15 ; 1.094,-1.15 1.094,-0.75 ; 1.094,0.75 1.094,1.15 ; 1.1,-1.15 1.1,-0.75 ; 1.1,0.75 1.1,1.15 ; 1.191,-1.15 1.191,-0.75 ; 1.191,0.75 1.191,1.15 ; -0.8,-1.45 -0.8,1.45 ; -0.8,-1.45 -0.719,-1.369 ; -0.8,-1.45 0.8,-1.45 ; -0.8,1.45 -0.719,1.369 ; -0.8,1.45 0.8,1.45 ; -0.719,-1.369 0.719,-1.369 ; -0.719,-1.369 -0.719,1.369 ; -0.719,1.369 0.719,1.369 ; 0.719,-1.369 0.8,-1.45 ; 0.719,-1.369 0.719,1.369 ; 0.719,1.369 0.8,1.45 ; 0.8,-1.45 0.8,1.45
Mechanical 15:
  circle w0.35: c-1.3,0.875 r0.025
  lines w0.15: -1.975,-1.525 -1.975,1.525 1.975,1.525 1.975,-1.525 -1.975,-1.525
  text ".Designator" at 0,0 h0.55
3D body "SOT23-5.STEP": height 1.44, standoff -0.01, extent -1.4,-1.45 1.4,1.45

## LP8758A1E0YFFR_QUAD_DC-DC_35DSBGA [mm]
pads (35):
  round 0.2 smd paste+0 mask+0.05: A1(-0.8,1.2) A2(-0.4,1.2) A3(0,1.2) A4(0.4,1.2) A5(0.8,1.2) B1(-0.8,0.8) B2(-0.4,0.8) B3(0,0.8) B4(0.4,0.8) B5(0.8,0.8) C1(-0.8,0.4) C2(-0.4,0.4) C3(0,0.4) C4(0.4,0.4) C5(0.8,0.4) D1(-0.8,0) D2(-0.4,0) D3(0,0) D4(0.4,0) D5(0.8,0) E1(-0.8,-0.4) E2(-0.4,-0.4) E3(0,-0.4) E4(0.4,-0.4) E5(0.8,-0.4) F1(-0.8,-0.8) F2(-0.4,-0.8) F3(0,-0.8) F4(0.4,-0.8) F5(0.8,-0.8) G1(-0.8,-1.2) G2(-0.4,-1.2) G3(0,-1.2) G4(0.4,-1.2) G5(0.8,-1.2)
Top Overlay:
  circle w0.15: c-1.525,1.525 r0.025
  lines w0.15: -1.225,-1.6 -1.225,1.6 1.225,1.6 1.225,-1.6 -1.225,-1.6
Mechanical 15:
  circle w0.2: c-0.8,1.2 r0.025
  lines w0.1: -0.375,0 0,0 ; 0,-0.375 0,0 ; 0,0.375 0,0 ; 0.375,0 0,0 ; -1.225,-1.6 1.225,-1.6 1.225,1.6 -1.225,1.6 -1.225,-1.6
  text ".Designator" at 0,0 h0.55
3D body: height 0.63, standoff 0.16, extent -1.075,-1.45 1.075,1.45
3D body: height 0.2, standoff -0.05, extent -0.517,-0.923 -0.275,-0.677
3D body: height 0.2, standoff -0.05, extent -0.917,-0.923 -0.675,-0.677
3D body: height 0.2, standoff -0.05, extent -0.517,-1.323 -0.275,-1.077
3D body: height 0.2, standoff -0.05, extent -0.917,-1.323 -0.675,-1.077
3D body: height 0.2, standoff -0.05, extent -0.917,-0.523 -0.675,-0.277
3D body: height 0.2, standoff -0.05, extent -0.517,-0.523 -0.275,-0.277
3D body: height 0.2, standoff -0.05, extent -0.917,1.077 -0.675,1.323
3D body: height 0.2, standoff -0.05, extent -0.517,1.077 -0.275,1.323
3D body: height 0.2, standoff -0.05, extent -0.517,0.677 -0.275,0.923
3D body: height 0.2, standoff -0.05, extent -0.917,0.677 -0.675,0.923
3D body: height 0.2, standoff -0.05, extent -0.517,0.277 -0.275,0.523
3D body: height 0.2, standoff -0.05, extent -0.917,0.277 -0.675,0.523
3D body: height 0.2, standoff -0.05, extent 0.683,-0.923 0.925,-0.677
3D body: height 0.2, standoff -0.05, extent 0.283,-0.923 0.525,-0.677
3D body: height 0.2, standoff -0.05, extent 0.683,-1.323 0.925,-1.077
3D body: height 0.2, standoff -0.05, extent 0.283,-1.323 0.525,-1.077
3D body: height 0.2, standoff -0.05, extent 0.283,-0.523 0.525,-0.277
3D body: height 0.2, standoff -0.05, extent 0.683,-0.523 0.925,-0.277
3D body: height 0.2, standoff -0.05, extent 0.283,1.077 0.525,1.323
3D body: height 0.2, standoff -0.05, extent 0.683,1.077 0.925,1.323
3D body: height 0.2, standoff -0.05, extent 0.683,0.677 0.925,0.923
3D body: height 0.2, standoff -0.05, extent 0.283,0.677 0.525,0.923
3D body: height 0.2, standoff -0.05, extent 0.683,0.277 0.925,0.523
3D body: height 0.2, standoff -0.05, extent 0.283,0.277 0.525,0.523
3D body: height 0.2, standoff -0.05, extent -0.917,-0.123 -0.675,0.123
3D body: height 0.2, standoff -0.05, extent -0.517,-0.123 -0.275,0.123
3D body: height 0.2, standoff -0.05, extent 0.283,-0.123 0.525,0.123
3D body: height 0.2, standoff -0.05, extent 0.683,-0.123 0.925,0.123
3D body: height 0.2, standoff -0.05, extent -0.117,-0.923 0.125,-0.677
3D body: height 0.2, standoff -0.05, extent -0.117,-1.323 0.125,-1.077
3D body: height 0.2, standoff -0.05, extent -0.117,-0.523 0.125,-0.277
3D body: height 0.2, standoff -0.05, extent -0.117,1.077 0.125,1.323
3D body: height 0.2, standoff -0.05, extent -0.117,0.677 0.125,0.923
3D body: height 0.2, standoff -0.05, extent -0.117,0.277 0.125,0.523
3D body: height 0.2, standoff -0.05, extent -0.117,-0.123 0.125,0.123

## LR44R_BATTERY_HOLDER [mm] "BATT RETAIN COIN 11.6MM 1CEL SMD"
pads (3):
  rrect50% 4x4 smd mask+0.05: 1(-8.25,0) 1(8.25,0)
  rrect50% 4.2x4.2 smd mask+0.05: 2(0,0)
Top Layer:
  pour cut-out: -6.25,-5.75 6.25,-5.75 6.25,5.25 -6.25,5.25
Top Overlay:
  lines w0.2: -10,-2.5 -10,-7 10,-7 10,-2.5 ; -10,2.5 -10,6.25 10,6.25 10,2.5 ; -9.25,-3.25 -7.5,-3.25 ; -8.375,-4.125 -8.375,-2.375 ; 7.5,-3.25 9.25,-3.25 ; 8.375,-4.125 8.375,-2.375
Mechanical 15:
  lines w0.2: -9.375,0 -7.125,0 ; -8.25,-1.125 -8.25,1.125 ; -1.125,0 1.125,0 ; -0.5,3.75 0,2.75 ; -0.5,4.5 0,5.5 ; 0.5,3.75 0,2.75 ; 0.5,4.5 0,5.5 ; 7.125,0 9.375,0 ; 8.25,-1.125 8.25,1.125 ; 0,2.75 0,5.5 ; -10.25,-7 -10.25,6.25 10.25,6.25 10.25,-7 -10.25,-7
  text ".Designator" at 0,0 h0.55
3D body "2996TR--3DModel-STEP-56544.STEP": height 5.97, standoff 0, extent -8.89,-6.782 8.89,5.279
3D body "User Library-LR44 Battery.step": height 5.5, standoff 0, extent -5.75,-5.75 5.75,5.75